# Altium schematic symbol library MeadowMinimum_Schematics_Symbols.SchLib: 8 symbols
Pins are listed as number, name and electrical type; pins without a type are passive.

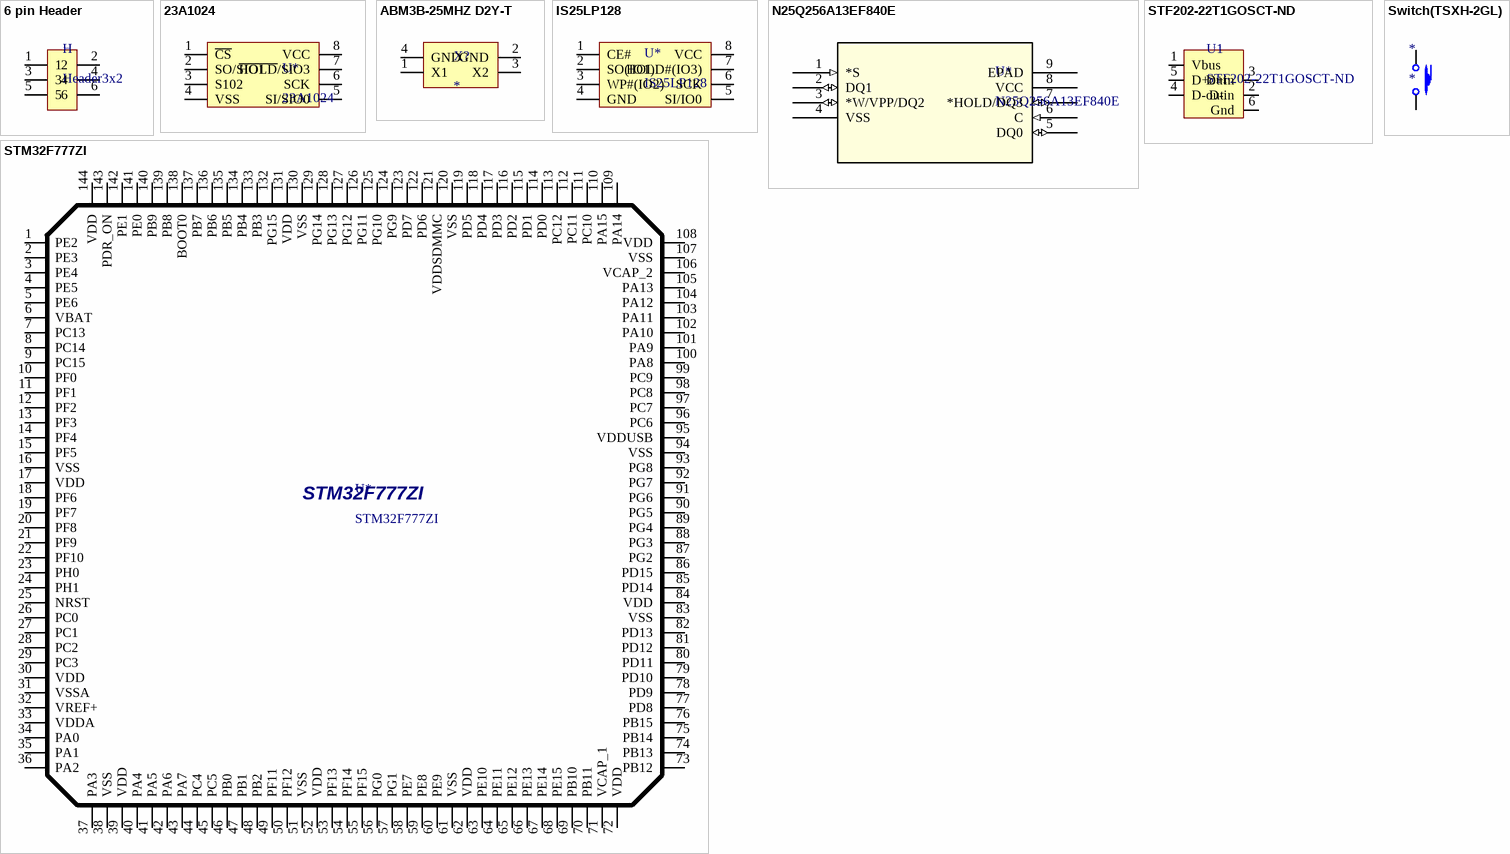
[diagram p0: symbols 6 pin Header to Switch(TSXH-2GL)]

## 6 pin Header
designator H, comment Header3x2
footprint 6 pin Header (Header3x2)
pins: 1, 2, 3, 4, 5, 6

## 23A1024
designator U*
1MB 1.8V 1MB QSPI SRAM    MOUSER PART # 579-23A1024-I/SN
pins: 1 ~{CS}, 2 SO/SIO1, 3 S102, 4 VSS, 5 SI/SIO0, 6 SCK, 7 ~{HOLD}/SIO3, 8 VCC

## ABM3B-25MHZ D2Y-T
designator X?
25MHz Crystal
pins: 1 X1, 2 GND, 3 X2, 4 GND

## IS25LP128
designator U*
IC FLASH 128MB 133MHZ  DIGIKEY PART # 706-1342-ND
pins: 1 CE#, 2 SO(IO1), 3 WP#(IO2), 4 GND, 5 SI/IO0, 6 SCK, 7 HOLD#(IO3), 8 VCC

## N25Q256A13EF840E
designator U*
pins: 1 *S (in), 2 DQ1 (io), 3 *W/VPP/DQ2 (io), 4 VSS (power), 5 DQ0 (io), 6 C (in), 7 *HOLD/DQ3 (io), 8 VCC (power), 9 EPAD

## STF202-22T1GOSCT-ND
designator U1
pins: 1 Vbus, 2 D-in, 3 D+in, 4 D-out, 5 D+out, 6 Gnd

## STM32F777ZI
designator U*
STM32F777ZI(144pin LQFP)
pins: 1 PE2, 2 PE3, 3 PE4, 4 PE5, 5 PE6, 6 VBAT, 7 PC13, 8 PC14, 9 PC15, 10 PF0, 11 PF1, 12 PF2, 13 PF3, 14 PF4, 15 PF5, 16 VSS, 17 VDD, 18 PF6, 19 PF7, 20 PF8, 21 PF9, 22 PF10, 23 PH0, 24 PH1, 25 NRST, 26 PC0, 27 PC1, 28 PC2, 29 PC3, 30 VDD, 31 VSSA, 32 VREF+, 33 VDDA, 34 PA0, 35 PA1, 36 PA2, 37 PA3, 38 VSS, 39 VDD, 40 PA4, 41 PA5, 42 PA6, 43 PA7, 44 PC4, 45 PC5, 46 PB0, 47 PB1, 48 PB2, 49 PF11, 50 PF12, 51 VSS, 52 VDD, 53 PF13, 54 PF14, 55 PF15, 56 PG0, 57 PG1, 58 PE7, 59 PE8, 60 PE9, 61 VSS, 62 VDD, 63 PE10, 64 PE11, 65 PE12, 66 PE13, 67 PE14, 68 PE15, 69 PB10, 70 PB11, 71 VCAP_1, 72 VDD, 73 PB12, 74 PB13, 75 PB14, 76 PB15, 77 PD8, 78 PD9, 79 PD10, 80 PD11, 81 PD12, 82 PD13, 83 VSS, 84 VDD, 85 PD14, 86 PD15, 87 PG2, 88 PG3, 89 PG4, 90 PG5, 91 PG6, 92 PG7, 93 PG8, 94 VSS, 95 VDDUSB, 96 PC6, 97 PC7, 98 PC8, 99 PC9, 100 PA8, 101 PA9, 102 PA10, 103 PA11, 104 PA12, 105 PA13, 106 VCAP_2, 107 VSS, 108 VDD, 109 PA14, 110 PA15, 111 PC10, 112 PC11, 113 PC12, 114 PD0, 115 PD1, 116 PD2, 117 PD3, 118 PD4, 119 PD5, 120 VSS, 121 VDDSDMMC, 122 PD6, 123 PD7, 124 PG9, 125 PG10, 126 PG11, 127 PG12, 128 PG13, 129 PG14, 130 VSS, 131 VDD, 132 PG15, 133 PB3, 134 PB4, 135 PB5, 136 PB6, 137 PB7, 138 BOOT0, 139 PB8, 140 PB9, 141 PE0, 142 PE1, 143 PDR_ON, 144 VDD

## Switch(TSXH-2GL)
designator *
pins: 1, 2